# Altium schematic symbol library 1 µF, 100 V, X7R, 0805.SchLib: 1 symbol
Pins are listed as number, name and electrical type; pins without a type are passive.

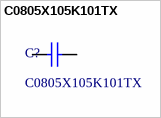
[diagram p0: symbol C0805X105K101TX]

## C0805X105K101TX
designator C?
1 µF, 100 V, X7R, 0805; Supplier 1: DigiKey; Supplier Part Number 1: 4587-AEC0805X105K101TXCT-ND; JLCPCB Part #: C382566
footprint C_0805_2012Metric (Chip Ceramic Capacitor, 2-Leads, Body 2.00x1.25mm, IPC Medium Density, Samsung 0805 Reference)
pins: 1, 2